# Altium schematic symbol library Orion-Bridge.SchLib: 24 symbols
Pins are listed as number, name and electrical type; pins without a type are passive.

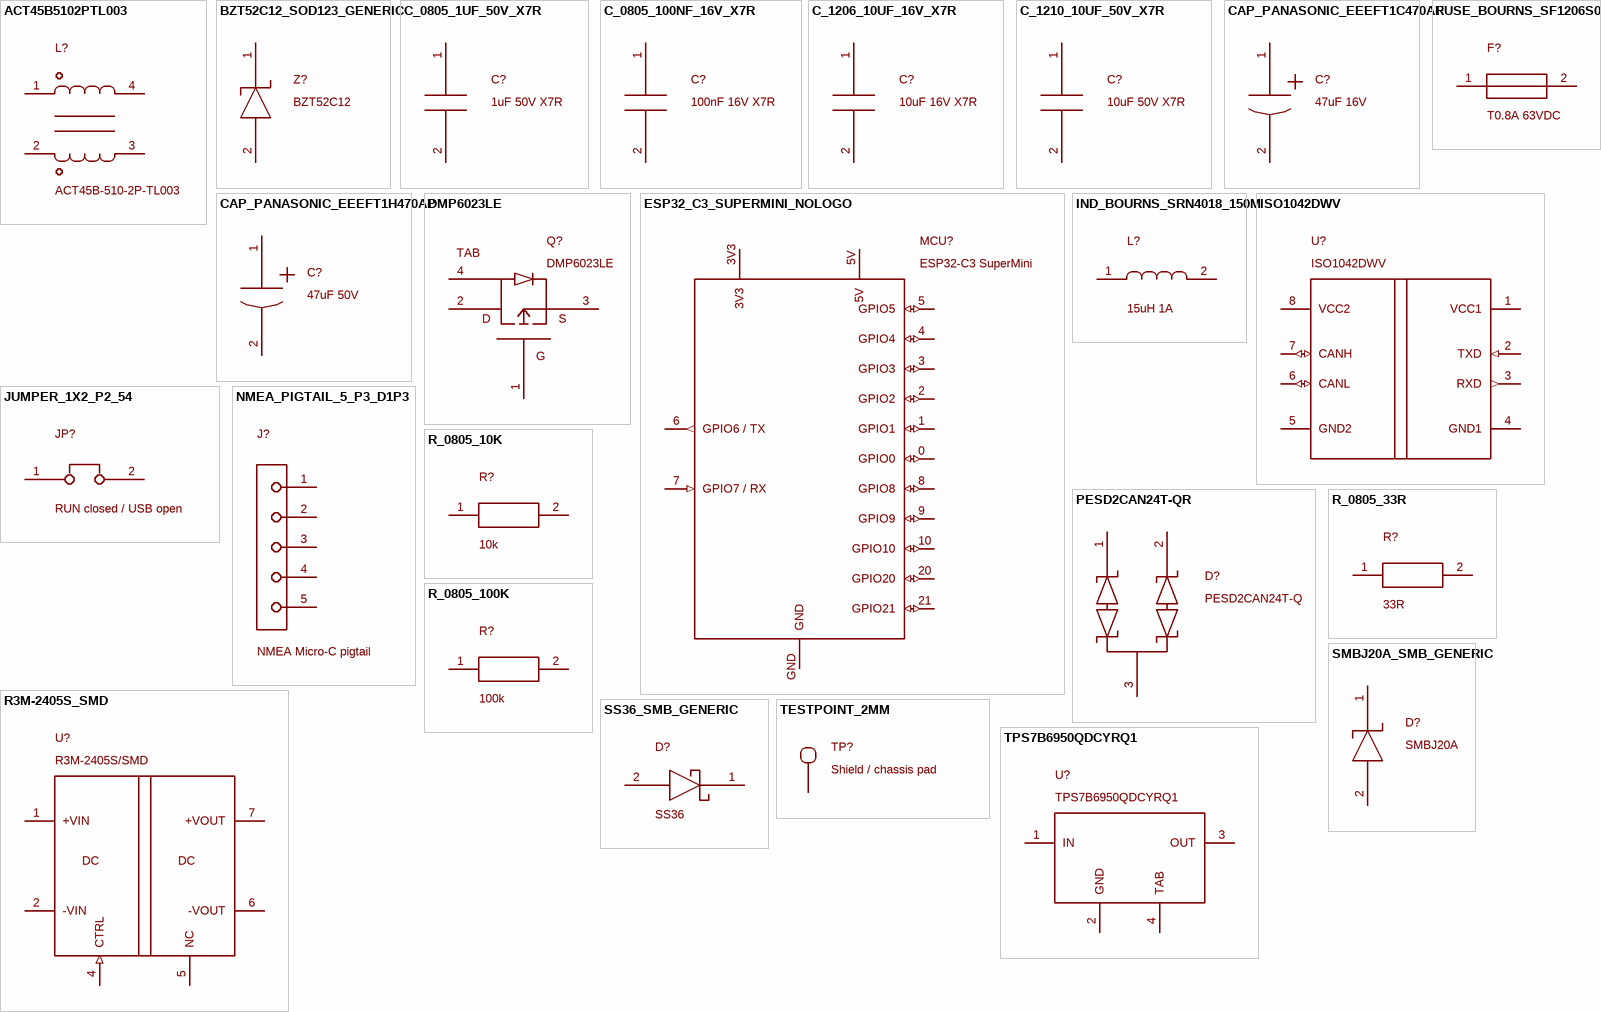
[diagram p0: symbols ACT45B5102PTL003 to TPS7B6950QDCYRQ1]

## ACT45B5102PTL003
designator L?, comment ACT45B-510-2P-TL003
Manufacturer: TDK; MPN: ACT45B5102PTL003; Manufacturer Part Number: ACT45B5102PTL003; Description: ACT45B-510-2P-TL003; Datasheet: https://www.tdk-electronics.tdk.com/inf/30/ds/act45b.pdf; Footprint Status: PROVISIONAL - verify landpattern before fabrication
footprint ACT45B
pins: 1 H_EXT, 2 L_EXT, 3 L_IC, 4 H_IC

## BZT52C12_SOD123_GENERIC
designator Z?, comment BZT52C12
BZT52C12 - generic specification; manufacturer/MPN not selected; Footprint Status: PROVISIONAL - verify landpattern before fabrication
footprint SOD123
pins: 1 K, 2 A

## C_0805_1UF_50V_X7R
designator C?, comment 1uF 50V X7R
1uF 50V X7R - generic specification; manufacturer/MPN not selected; Footprint Status: PROVISIONAL - verify landpattern before fabrication
footprint C0805
pins: 1, 2

## C_0805_100NF_16V_X7R
designator C?, comment 100nF 16V X7R
100nF 16V X7R - generic specification; manufacturer/MPN not selected; Footprint Status: PROVISIONAL - verify landpattern before fabrication
footprint C0805
pins: 1, 2

## C_1206_10UF_16V_X7R
designator C?, comment 10uF 16V X7R
10uF 16V X7R - generic specification; manufacturer/MPN not selected; Footprint Status: PROVISIONAL - verify landpattern before fabrication
footprint C1206
pins: 1, 2

## C_1210_10UF_50V_X7R
designator C?, comment 10uF 50V X7R
10uF 50V X7R - generic specification; manufacturer/MPN not selected; Footprint Status: PROVISIONAL - verify landpattern before fabrication
footprint C1210
pins: 1, 2

## CAP_PANASONIC_EEEFT1C470AR
designator C?, comment 47uF 16V
47 uF 16 V FT-series SMD aluminum electrolytic, size B, standard product; Manufacturer: Panasonic Industry; MPN: EEEFT1C470AR; Manufacturer Part Number: EEEFT1C470AR; Datasheet: https://industrial.panasonic.com/cdbs/www-data/pdf/RDE0000/ABA0000C1240.pdf; Footprint Status: Manufacturer recommended lands verified from primary datasheet; assembly/electrical qualification remains
footprint PANASONIC_FT_D4
pins: 1 +, 2 -

## CAP_PANASONIC_EEEFT1H470AP
designator C?, comment 47uF 50V
47 uF 50 V FT-series SMD aluminum electrolytic, size D, standard product; Manufacturer: Panasonic Industry; MPN: EEEFT1H470AP; Manufacturer Part Number: EEEFT1H470AP; Datasheet: https://industrial.panasonic.com/cdbs/www-data/pdf/RDE0000/ABA0000C1240.pdf; Footprint Status: Manufacturer recommended lands verified from primary datasheet; assembly/electrical qualification remains
footprint PANASONIC_FT_D6P3
pins: 1 +, 2 -

## DMP6023LE
designator Q?
Manufacturer: Diodes Incorporated; MPN: DMP6023LE; Manufacturer Part Number: DMP6023LE; Description: DMP6023LE; Datasheet: https://www.diodes.com/datasheet/download/DMP6023LE.pdf; Footprint Status: Diodes manufacturer suggested land pattern, DS37199 Rev.3-2 p6
footprint SOT223_DIODES_DMP6023LE
pins: 1 G, 2 D, 3 S, 4 TAB=D
text: TAB

## ESP32_C3_SUPERMINI_NOLOGO
designator MCU?, comment ESP32-C3 SuperMini
Nologo ESP32-C3 SuperMini module, two 1x8 carrier headers, GPIO6 TX / GPIO7 RX; Manufacturer: Nologo Tech; MPN: ESP32-C3 SuperMini; Manufacturer Part Number: ESP32-C3 SuperMini; Datasheet: https://github.com/NologoTech/ESP32C3-Supermini/tree/main/Hardware; Footprint Status: Nologo source-based header pin geometry. Local model assumes 3.1 mm underside clearance and 7.2 mm total height; no separate socket part is specified.
footprint NOLOGO_C3_SUPERMINI_THT_2X8
pins: 0 GPIO0 (io), 1 GPIO1 (io), 2 GPIO2 (io), 3 GPIO3 (io), 3V3 (power), 4 GPIO4 (io), 5 GPIO5 (io), 5V (power), 6 GPIO6 / TX (out), 7 GPIO7 / RX (in), 8 GPIO8 (io), 9 GPIO9 (io), 10 GPIO10 (io), 20 GPIO20 (io), 21 GPIO21 (io), GND (power)

## FUSE_BOURNS_SF1206S080
designator F?, comment T0.8A 63VDC
0.8 A slow-blow SMD ceramic fuse, 63 VDC, 50 A interrupt rating; Manufacturer: Bourns; MPN: SF-1206S080-2; Manufacturer Part Number: SF-1206S080-2; Datasheet: https://www.bourns.com/docs/product-datasheets/sf-1206s.pdf; Footprint Status: Manufacturer recommended lands verified from primary datasheet; assembly/electrical qualification remains
footprint BOURNS_SF1206S
pins: 1, 2

## IND_BOURNS_SRN4018_150M
designator L?, comment 15uH 1A
15 uH semi-shielded power inductor, 1.0 A RMS and 1.1 A saturation rating; Manufacturer: Bourns; MPN: SRN4018-150M; Manufacturer Part Number: SRN4018-150M; Datasheet: https://www.bourns.com/docs/product-datasheets/srn4018.pdf; Footprint Status: Manufacturer recommended lands verified from primary datasheet; assembly/electrical qualification remains
footprint BOURNS_SRN4018
pins: 1, 2

## ISO1042DWV
designator U?
Manufacturer: Texas Instruments; MPN: ISO1042DWV; Manufacturer Part Number: ISO1042DWV; Description: ISO1042DWV; Datasheet: https://www.ti.com/lit/ds/symlink/iso1042.pdf; Footprint Status: PROVISIONAL - verify landpattern before fabrication
footprint SOIC8_DWV
pins: 1 VCC1 (power), 2 TXD (in), 3 RXD (out), 4 GND1 (power), 5 GND2 (power), 6 CANL (io), 7 CANH (io), 8 VCC2 (power)

## JUMPER_1X2_P2_54
designator JP?, comment RUN closed / USB open
RUN closed / USB open - generic specification; manufacturer/MPN not selected; Footprint Status: PROVISIONAL - verify landpattern before fabrication
footprint HDR1X2_2.54
pins: 1, 2

## NMEA_PIGTAIL_5_P3_D1P3
designator J?, comment NMEA Micro-C pigtail
Five direct wire-solder pads for a separately selected Micro-C cable; this is a PCB interface, not an invented connector MPN or face view; Footprint Status: Designed wire interface; cable conductor and strain relief selection pending
footprint PIGTAIL_5_P3_D1P3
pins: 1 SHIELD, 2 NET-S, 3 NET-C, 4 CAN-H, 5 CAN-L

## PESD2CAN24T-QR
designator D?, comment PESD2CAN24T-Q
Manufacturer: Nexperia; MPN: PESD2CAN24T-QR; Manufacturer Part Number: PESD2CAN24T-QR; Description: PESD2CAN24T-Q; Datasheet: https://assets.nexperia.com/documents/data-sheet/PESD2CAN24T-Q.pdf; Footprint Status: Nexperia PESD2CAN24T-Q datasheet Fig10 reflow lands, 9-Feb-2024 p8
footprint SOT23_NEXPERIA_REFLOW
pins: 1 K1, 2 K2, 3 CC

## R3M-2405S_SMD
designator U?, comment R3M-2405S/SMD
Manufacturer: RECOM; MPN: R3M-2405S/SMD; Manufacturer Part Number: R3M-2405S/SMD; Description: R3M-2405S/SMD; Datasheet: https://recom-power.com/pdf/Econoline/R3M.pdf; Footprint Status: PROVISIONAL - verify landpattern before fabrication
footprint R3M_SMD
pins: 1 +VIN (power), 2 -VIN (power), 4 CTRL (in), 5 NC, 6 -VOUT (power), 7 +VOUT (power)
text: DC

## R_0805_10K
designator R?, comment 10k
10k - generic specification; manufacturer/MPN not selected; Footprint Status: PROVISIONAL - verify landpattern before fabrication
footprint R0805
pins: 1, 2

## R_0805_33R
designator R?, comment 33R
33R - generic specification; manufacturer/MPN not selected; Footprint Status: PROVISIONAL - verify landpattern before fabrication
footprint R0805
pins: 1, 2

## R_0805_100K
designator R?, comment 100k
100k - generic specification; manufacturer/MPN not selected; Footprint Status: PROVISIONAL - verify landpattern before fabrication
footprint R0805
pins: 1, 2

## SMBJ20A_SMB_GENERIC
designator D?, comment SMBJ20A
SMBJ20A - generic specification; manufacturer/MPN not selected; Footprint Status: PROVISIONAL - verify landpattern before fabrication
footprint SMB
pins: 1 K, 2 A

## SS36_SMB_GENERIC
designator D?, comment SS36
SS36 - generic specification; manufacturer/MPN not selected; Footprint Status: PROVISIONAL - verify landpattern before fabrication
footprint SMB
pins: 1 K, 2 A

## TESTPOINT_2MM
designator TP?, comment Shield / chassis pad
Shield / chassis pad - generic specification; manufacturer/MPN not selected; Footprint Status: PROVISIONAL - verify landpattern before fabrication
footprint TESTPOINT_2MM
pins: 1 SHIELD

## TPS7B6950QDCYRQ1
designator U?
Manufacturer: Texas Instruments; MPN: TPS7B6950QDCYRQ1; Manufacturer Part Number: TPS7B6950QDCYRQ1; Description: TPS7B6950QDCYRQ1; Datasheet: https://www.ti.com/lit/ds/symlink/tps7b69-q1.pdf; Footprint Status: TI DCY mechanical envelope verified; R2 engineering lands retained, not manufacturer-recommended lands. Thermal/assembly qualification required.
footprint SOT223_LDO
pins: 1 IN (power), 2 GND (power), 3 OUT (power), 4 TAB (power)